# Altium footprint library semubot_lidar_driver_footprints.PcbLib: 25 footprints (part 1 of 2)
Each footprint in its own frame and in the unit in brackets; x right, y up, seen from the top. Pads: shape width x height; smd on the part's side, far side on the other; paste and mask are expansions set on the pad; w line width, h text height; cw(c..) or ccw(c..) is an arc to the next point about the centre after c.
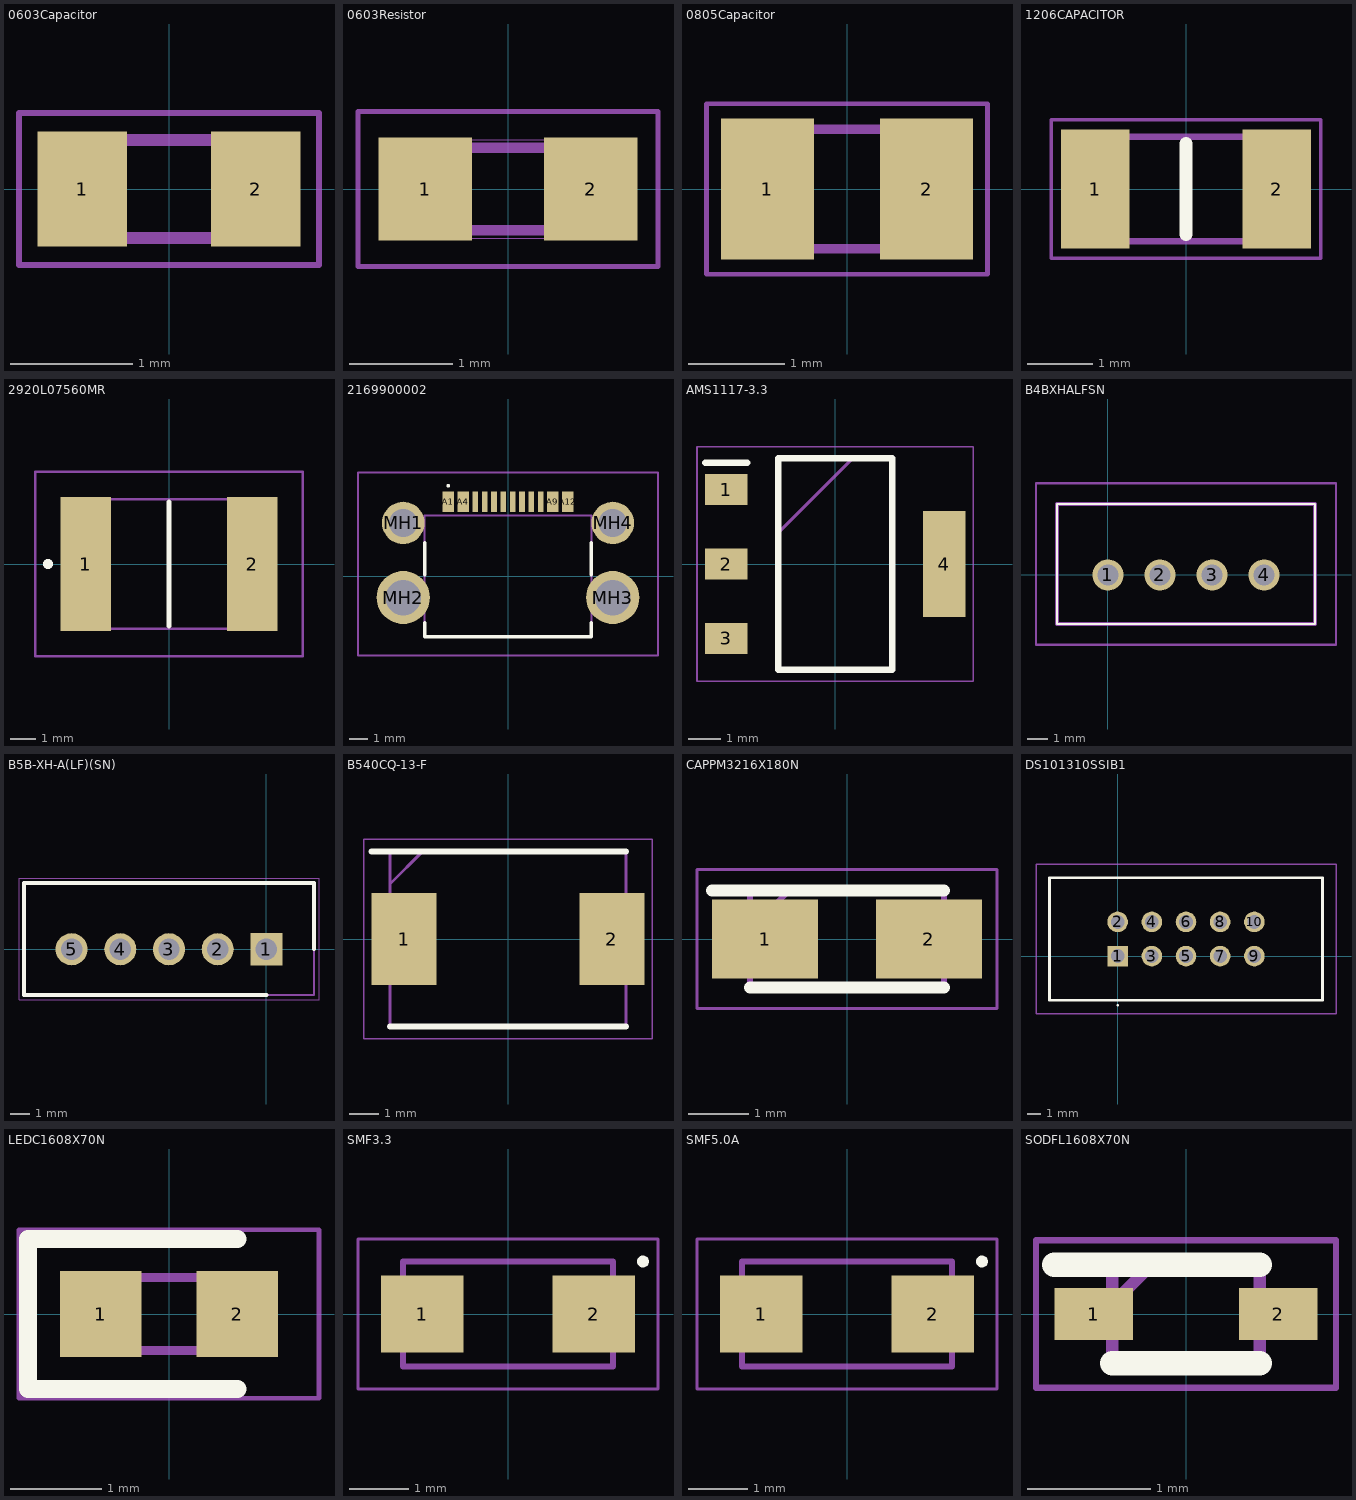
[diagram p0: the footprints below, top view; thin cyan lines are the x and y axes]

## 0603Capacitor [mm]
pads (2):
  rect 0.73x0.94 smd: 1(-0.71,0) 2(0.71,0)
Mechanical 13:
  lines w0.1: -0.8,-0.4 0.8,-0.4 0.8,0.4 -0.8,0.4 -0.8,-0.4
Mechanical 15:
  lines w0.05: -1.225,-0.62 1.225,-0.62 1.225,0.62 -1.225,0.62 -1.225,-0.62
3D body "CL10A106MP8NNNC.stp": height 0.9, standoff 0, extent -0.8,-0.4 0.8,0.4

## 0603Resistor [mm]
pads (2):
  rect 0.9x1 smd: 1(-0.8,0) 2(0.8,0)
Mechanical 13:
  lines w0.1: -0.8,-0.4 -0.8,0.4 0.8,0.4 0.8,-0.4 -0.8,-0.4
Mechanical 15:
  lines w0.001: -0.85,-0.475 -0.85,0.475 0.85,0.475 0.85,-0.475 -0.85,-0.475
  lines w0.05: -1.45,-0.75 -1.45,0.75 1.45,0.75 1.45,-0.75 -1.45,-0.75
3D body "RC0603FR-0752K3L.stp": height 0.55, standoff 0, extent -0.8,-0.4 0.8,0.4

## 0805Capacitor [mm]
pads (2):
  rect 0.97x1.47 smd: 1(-0.83,0) 2(0.83,0)
Mechanical 13:
  lines w0.1: -1,-0.625 1,-0.625 1,0.625 -1,0.625 -1,-0.625
Mechanical 15:
  lines w0.05: -1.465,-0.89 1.465,-0.89 1.465,0.89 -1.465,0.89 -1.465,-0.89
3D body "CL21A226MAYNNNE.stp": height 1.45, standoff 0, extent -1,-0.625 1,0.625

## 1206CAPACITOR [mm]
pads (2):
  rect 1.05x1.82 smd: 1(-1.39,0) 2(1.39,0)
Top Overlay:
  lines w0.2: 0,-0.7 0,0.7
Mechanical 13:
  lines w0.1: -1.6,-0.8 1.6,-0.8 1.6,0.8 -1.6,0.8 -1.6,-0.8
Mechanical 15:
  lines w0.05: -2.065,-1.06 2.065,-1.06 2.065,1.06 -2.065,1.06 -2.065,-1.06
3D body "CL31A476MPHNNNE.stp": height 1.8, standoff 0, extent -1.6,-0.8 1.6,0.8

## 2920L07560MR [mm]
pads (2):
  rect 2x5.3 smd: 1(-3.3,0) 2(3.3,0)
Top Overlay:
  lines w0.2: 0,-2.46 0,2.46 ; -4.8,-0.1 ccw(c-4.8,0) -4.8,0.1 ccw(c-4.8,0) -4.8,-0.1
Mechanical 13:
  lines w0.1: -3.678,-2.56 -3.678,2.56 3.678,2.56 3.678,-2.56 -3.678,-2.56
Mechanical 15:
  lines w0.1: -5.3,-3.65 -5.3,3.65 5.3,3.65 5.3,-3.65 -5.3,-3.65
3D body "2920L400_15MR.stp": height 1.19, standoff -0.01, extent -3.678,-2.56 3.678,2.56

## 2169900002 [mm]
pads (16):
  rect 0.6x1.1 smd: A1(-3.2,4) A4(-2.4,4) A9(2.4,4) A12(3.2,4)
  rect 0.3x1.1 smd: A5(-1.25,4) A6(-0.25,4) A7(0.25,4) A8(1.25,4) B5(1.75,4) B6(0.75,4) B7(-0.75,4) B8(-1.75,4)
  round 2.28 hole 1.52: MH1(-5.62,2.85) MH4(5.62,2.85)
  round 2.85 hole 1.9: MH2(-5.62,-1.15) MH3(5.62,-1.15)
Top Overlay:
  lines w0.1: -3.2,4.8 ccw(c-3.2,4.85) -3.2,4.9 ccw(c-3.2,4.85) -3.2,4.8
  lines w0.2: -4.47,-2.515 -4.47,-3.25 4.47,-3.25 4.47,-2.515 ; -4.47,0.085 -4.47,1.785 ; 4.47,0.085 4.47,1.785
Mechanical 13:
  lines w0.1: -4.47,-3.25 4.47,-3.25 4.47,3.25 -4.47,3.25 -4.47,-3.25
Mechanical 15:
  lines w0.1: -8.045,-4.25 8.045,-4.25 8.045,5.55 -8.045,5.55 -8.045,-4.25
3D body "2169900002.stp": height 2.5, standoff -0.71, extent -5.77,-2.95 5.77,4.25

## AMS1117-3.3 [mm] "C6186"
pads (4):
  rect 1.3x0.95 smd: 1(-3.35,2.29) 2(-3.35,0) 3(-3.35,-2.29)
  rect 1.3x3.25 smd: 4(3.35,0)
Top Overlay:
  lines w0.2: -4,3.115 -2.7,3.115 ; -1.752,-3.252 1.752,-3.252 1.752,3.252 -1.752,3.252 -1.752,-3.252
Mechanical 13:
  lines w0.1: -1.752,0.962 0.538,3.252 ; -1.752,-3.252 1.752,-3.252 1.752,3.252 -1.752,3.252 -1.752,-3.252
Mechanical 15:
  lines w0.05: -4.25,-3.605 4.25,-3.605 4.25,3.605 -4.25,3.605 -4.25,-3.605
3D body "AMS1117-1.5.stp": height 1.8, standoff 0, extent -3.5,-3.253 3.5,3.253

## B4BXHALFSN [mm]
pads (4):
  round 1.5 hole 1: 1(0,0) 2(2.5,0) 3(5,0) 4(7.5,0)
Top Overlay:
  lines w0.1: -2.45,-2.35 -2.45,3.4 9.95,3.4 9.95,-2.35 -2.45,-2.35
Mechanical 13:
  lines w0.2: -2.45,-2.35 -2.45,3.4 9.95,3.4 9.95,-2.35 -2.45,-2.35
Mechanical 15:
  lines w0.1: -3.45,-3.35 -3.45,4.4 10.95,4.4 10.95,-3.35 -3.45,-3.35
3D body "B4B-XH-A_LF__SN_.stp": height 7.52, standoff -2.88, extent -2.454,-2.355 9.946,3.395

## B5B-XH-A(LF)(SN) [mm]
pads (5):
  rect 1.65x1.65 hole 1.1: 1(0,0)
  round 1.65 hole 1.1: 2(-2.5,0) 3(-5,0) 4(-7.5,0) 5(-10,0)
Top Overlay:
  lines w0.2: 0,-2.35 -12.45,-2.35 -12.45,3.4 2.45,3.4 2.45,0
Mechanical 13:
  lines w0.1: -12.45,-2.35 -12.45,3.4 2.45,3.4 2.45,-2.35 -12.45,-2.35
Mechanical 15:
  lines w0.05: -12.7,-2.6 -12.7,3.65 2.7,3.65 2.7,-2.6 -12.7,-2.6
3D body "B5B-XH-A-LF--SN---3DModel-STEP-418109.STEP": height 7, standoff -3.4, extent -12.403,-2.448 2.497,3.302

## B540CQ-13-F [mm]
pads (2):
  rect 2.2x3.1 smd: 1(-3.5,0) 2(3.5,0)
Top Overlay:
  lines w0.2: -4.6,2.952 3.97,2.952 ; -3.97,-2.952 3.97,-2.952
Mechanical 13:
  lines w0.1: -3.97,1.852 -2.87,2.952 ; -3.97,-2.952 3.97,-2.952 3.97,2.952 -3.97,2.952 -3.97,-2.952
Mechanical 15:
  lines w0.05: -4.85,-3.36 4.85,-3.36 4.85,3.36 -4.85,3.36 -4.85,-3.36
3D body "B540CQ-13-F.stp": height 2.5, standoff 0, extent -3.97,-2.953 3.97,2.953

## CAPPM3216X180N [mm]
pads (2):
  rect 1.75x1.3 smd: 1(-1.35,0) 2(1.35,0)
Top Overlay:
  lines w0.2: -2.225,0.8 1.6,0.8 ; -1.6,-0.8 1.6,-0.8
Mechanical 13:
  lines w0.1: -1.6,0.15 -0.95,0.8 ; -1.6,-0.8 1.6,-0.8 1.6,0.8 -1.6,0.8 -1.6,-0.8
Mechanical 15:
  lines w0.05: -2.475,-1.15 2.475,-1.15 2.475,1.15 -2.475,1.15 -2.475,-1.15
3D body "CA45-A010K226T.stp": height 1.8, standoff 0, extent -1.6,-0.8 1.6,0.8

## DS101310SSIB1 [mm]
pads (10):
  rect 1.53x1.53 hole 1.02: 1(0,0)
  round 1.53 hole 1.02: 2(0,2.54) 3(2.54,0) 4(2.54,2.54) 5(5.08,0) 6(5.08,2.54) 7(7.62,0) 8(7.62,2.54) 9(10.16,0) 10(10.16,2.54)
Top Overlay:
  lines w0.1: 0,-3.7 cw(c0,-3.65) 0,-3.6 cw(c0,-3.65) 0,-3.7
  lines w0.2: -5.07,-3.28 15.23,-3.28 15.23,5.82 -5.07,5.82 -5.07,-3.28
Mechanical 13:
  lines w0.1: -5.07,-3.28 15.23,-3.28 15.23,5.82 -5.07,5.82 -5.07,-3.28
Mechanical 15:
  lines w0.1: -6.07,-4.28 16.23,-4.28 16.23,6.82 -6.07,6.82 -6.07,-4.28
3D body "DS1013-10SSIB1.stp": height 9.65, standoff -5, extent -5.07,-3.28 15.23,5.82

## LEDC1608X70N [mm]
pads (2):
  rect 0.9x0.95 smd: 1(-0.75,0) 2(0.75,0)
Top Overlay:
  lines w0.2: 0.75,-0.825 -1.55,-0.825 -1.55,0.825 0.75,0.825
Mechanical 13:
  lines w0.1: -0.8,0.133 -0.533,0.4 ; -0.8,-0.4 -0.8,0.4 0.8,0.4 0.8,-0.4 -0.8,-0.4
Mechanical 15:
  lines w0.05: -1.65,-0.925 -1.65,0.925 1.65,0.925 1.65,-0.925 -1.65,-0.925
3D body "KT-0603R--3DModel-STEP-269445.STEP": height 0.65, standoff 0, extent -0.8,-0.4 0.8,0.4

## SMF3.3 [mm] "TVS DIODE 3V3"
pads (2):
  rect 1.4x1.3 smd: 1(-1.45,0) 2(1.45,0)
Top Overlay:
  circle w0.1: c2.286,0.889 r0.05
Mechanical 13:
  lines w0.1: -1.778,-0.889 1.778,-0.889 1.778,0.889 -1.778,0.889 -1.778,-0.889
Mechanical 15:
  lines w0.05: -2.54,-1.27 2.54,-1.27 2.54,1.27 -2.54,1.27 -2.54,-1.27
3D body "SMF5.0A.stp": height 1.1, standoff 0, extent -1.825,-0.875 1.825,0.875

## SMF5.0A [mm]
pads (2):
  rect 1.4x1.3 smd: 1(-1.45,0) 2(1.45,0)
Top Overlay:
  circle w0.1: c2.286,0.889 r0.05
Mechanical 13:
  lines w0.1: -1.778,-0.889 -1.778,0.889 1.778,0.889 1.778,-0.889 -1.778,-0.889
Mechanical 15:
  lines w0.05: -2.54,-1.27 -2.54,1.27 2.54,1.27 2.54,-1.27 -2.54,-1.27
3D body "SMF5.0A.stp": height 1.1, standoff 0, extent -1.825,-0.875 1.825,0.875

## SODFL1608X70N [mm]
pads (2):
  rect 0.64x0.42 smd: 1(-0.75,0) 2(0.75,0)
Top Overlay:
  lines w0.2: -1.07,0.4 0.6,0.4 ; -0.6,-0.4 0.6,-0.4
Mechanical 13:
  lines w0.1: -0.6,0.08 -0.28,0.4 ; -0.6,-0.4 -0.6,0.4 0.6,0.4 0.6,-0.4 -0.6,-0.4
Mechanical 15:
  lines w0.05: -1.22,-0.6 -1.22,0.6 1.22,0.6 1.22,-0.6 -1.22,-0.6
3D body "ESD5Z3.3T1G.stp": height 0.7, standoff 0, extent -0.8,-0.4 0.8,0.4